# Altium footprint library Inductors.PcbLib: 1 footprints
Each footprint in its own frame and in the unit in brackets; x right, y up, seen from the top. Pads: shape width x height; smd on the part's side, far side on the other; paste and mask are expansions set on the pad; w line width, h text height; cw(c..) or ccw(c..) is an arc to the next point about the centre after c.
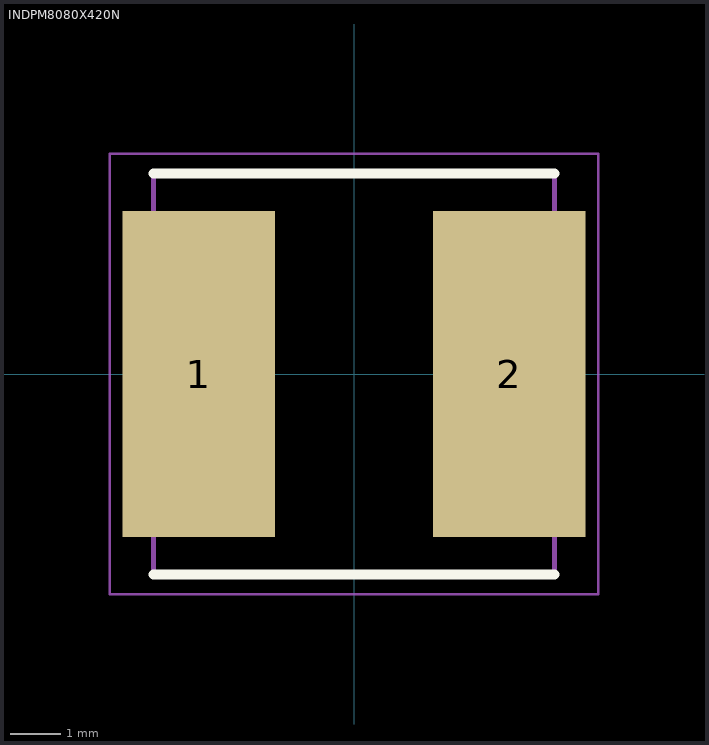
[diagram p0: the footprint, top view; thin cyan lines are the x and y axes]

## INDPM8080X420N [mm] "Power Inductors 10uH +/-20% 3.3A SMD,8.0x8.0x4.0mm RoHS"
pads (2):
  rect 3.05x6.5 smd: 1(-3.1,0) 2(3.1,0)
Top Overlay:
  lines w0.2: -4,-4 4,-4 ; -4,4 4,4
Top Courtyard:
  lines w0.1: -4,-4 4,-4 4,4 -4,4 -4,-4
Bottom Assembly:
  lines w0.05: -4.875,-4.4 4.875,-4.4 4.875,4.4 -4.875,4.4 -4.875,-4.4
3D body "SWPA8040S100MT.stp": height 4.2, standoff 0, extent -4,-4 4,4